# Altium integrated library Altium_USB.IntLib: 46 symbols (part 1 of 2)
Pins are listed as number, name and electrical type; pins without a type are passive.

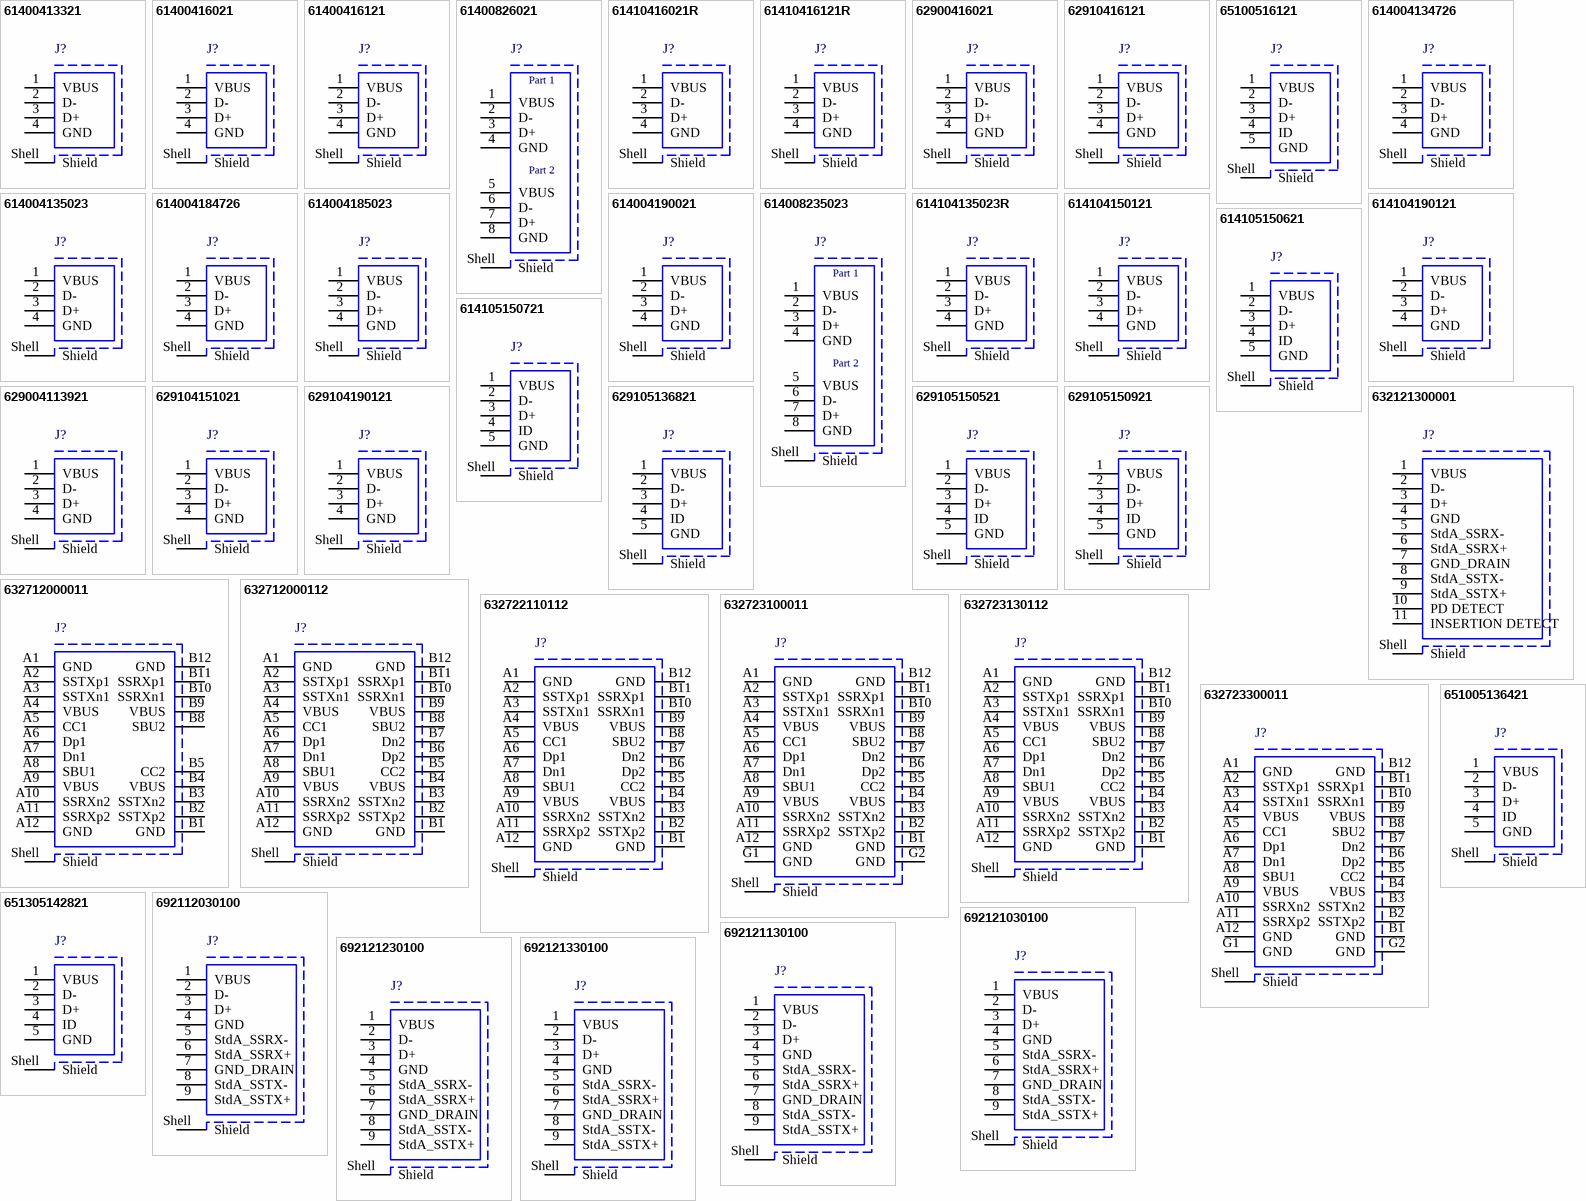
[diagram p0: symbols 61400413321 to 692121330100]

## 61400413321
designator J?
USB 2.0 Type B Receptacle WR-COM, Vertical, THT; Part Number: 61400413321; Rated Current: 1.5 A; Contact Resistance: 20 mOhm; Working Voltage: 30 VAC; Supply Name 1: Mouser; Supply SN 1: 710-61400413321; Supply Name 2: thegioiic; ComponentLink1Description: Manufacturer; ComponentLink1URL: http://www.we-online.de; ComponentLink2Description: Datasheet; ComponentLink2URL: https://katalog.we-online.de/em/datasheet/61400413321.pdf; Published Date: September 2018; Publisher: Wurth Elektronik; Orientation: Vertical; Connector Type: USB 2.0 Type B; Operating Temperature: -40 to 105 degC; Mounting Technology: THT; Gender: Receptacle; Packaging: Tray; ComponentLink3Description: Global Supply; ComponentLink3URL: https://www.we-online.com/en/components/products/COM_TYPE_B_VERTICAL?sq=61400413321#61400413321; ComponentLink4Description: Global Supply; ComponentLink4URL: https://www.mouser.vn/ProductDetail/Wurth-Elektronik/61400413321?qs=rS3zZhy2AQPX0EcryzeSDw%3D%3D; ComponentLink5Description: Local Supply; ComponentLink5URL: https://www.thegioiic.com/bf180-cong-usb-cai-2-0-type-b-4-chan-thang-xuyen-lo; Supply URL 1: https://www.mouser.vn/ProductDetail/Wurth-Elektronik/61400413321?qs=rS3zZhy2AQPX0EcryzeSDw%3D%3D; Supply URL 2: https://www.thegioiic.com/bf180-cong-usb-cai-2-0-type-b-4-chan-thang-xuyen-lo
footprint 61400413321
pins: 1 VBUS, 2 D-, 3 D+, 4 GND, Shell Shield

## 61400416021
designator J?
USB 2.0 Type A Receptacle WR-COM, Horizontal, THT; Part Number: 61400416021; Rated Current: 1.5 A; Contact Resistance: 20 mOhm; Working Voltage: 30 VAC; Supply Name 1: Mouser; Supply SN 1: 710-61400416021; ComponentLink1Description: Manufacturer; ComponentLink1URL: http://www.we-online.de; ComponentLink2Description: Datasheet; ComponentLink2URL: https://katalog.we-online.de/em/datasheet/61400416021.pdf; Published Date: September 2018; Publisher: Wurth Elektronik; Orientation: Horizontal; Connector Type: USB 2.0 Type A; Operating Temperature: -40 to 105 degC; Mounting Technology: THT; Gender: Receptacle; Packaging: Tray; ComponentLink3Description: Global Supply; ComponentLink3URL: https://www.we-online.com/en/components/products/COM_TYPE_A_HORIZONTAL?sq=61400416021#61400416021; ComponentLink4Description: Global Supply; ComponentLink4URL: https://www.mouser.vn/c/?q=61400416021; Supply URL 1: https://www.mouser.vn/ProductDetail/Wurth-Elektronik/61400416021?qs=rS3zZhy2AQM1ZldAqz%2FFOw%3D%3D
footprint 61400416021
pins: 1 VBUS, 2 D-, 3 D+, 4 GND, Shell Shield

## 61400416121
designator J?
USB 2.0 Type B Receptacle WR-COM, Horizontal, THT, with Pads and Pegs; Part Number: 61400416121; Rated Current: 1.5 A; Contact Resistance: 20 mOhm; Working Voltage: 30 VAC; Supply Name 1: Mouser; Supply SN 1: 710-61400416121; ComponentLink1Description: Manufacturer; ComponentLink1URL: http://www.we-online.de; ComponentLink2Description: Datasheet; ComponentLink2URL: https://katalog.we-online.de/em/datasheet/61400416121.pdf; Published Date: September 2018; Publisher: Wurth Elektronik; Orientation: Horizontal; Connector Type: USB 2.0 Type B; Operating Temperature: -40 to 105 degC; Mounting Technology: THT; Gender: Receptacle; Packaging: Tray; ComponentLink3Description: Global Supply; ComponentLink3URL: https://www.we-online.com/en/components/products/COM_TYPE_B_HORIZONTAL?sq=61400416121#61400416121; ComponentLink4Description: Global Supply; ComponentLink4URL: https://www.mouser.vn/ProductDetail/Wurth-Elektronik/61400416121?qs=rS3zZhy2AQOfJvFesH7XZA%3D%3D; Supply URL 1: https://www.mouser.vn/ProductDetail/Wurth-Elektronik/61400416121?qs=rS3zZhy2AQOfJvFesH7XZA%3D%3D
footprint 61400416121
pins: 1 VBUS, 2 D-, 3 D+, 4 GND, Shell Shield

## 61400826021
designator J?
USB 2.0 Type A Receptacle WR-COM, Stacked Horizontal, THT; Part Number: 61400826021; Rated Current: 1.5 A; Contact Resistance: 20 mOhm; Working Voltage: 30 VAC; Supply Name 1: Mouser; Supply SN 1: 710-61400826021; Supply Name 2: thegioiic; ComponentLink1Description: Manufacturer; ComponentLink1URL: http://www.we-online.de; ComponentLink2Description: Datasheet; ComponentLink2URL: https://katalog.we-online.de/em/datasheet/61400826021.pdf; Published Date: September 2018; Publisher: Wurth Elektronik; Orientation: Stacked Horizontal; Connector Type: USB 2.0 Type A; Operating Temperature: -40 to 105 degC; Mounting Technology: THT; Gender: Receptacle; Packaging: Tray; ComponentLink3Description: Global Supply; ComponentLink3URL: https://www.we-online.com/en/components/products/COM_TYPE_A_HORIZONTAL_DUAL_STACKED?sq=61400826021#61400826021; ComponentLink4Description: Global Supply; ComponentLink4URL: https://www.mouser.vn/ProductDetail/Wurth-Elektronik/61400826021?qs=rS3zZhy2AQNRjP3Vs%2FPxTg%3D%3D; ComponentLink5Description: Local Supply; ComponentLink5URL: https://www.thegioiic.com/cong-usb-cai-doi-2-0-type-a-8-chan-cong-90-do-v2; Supply URL 1: https://www.mouser.vn/ProductDetail/Wurth-Elektronik/61400826021?qs=rS3zZhy2AQNRjP3Vs%2FPxTg%3D%3D; Supply URL 2: https://www.thegioiic.com/cong-usb-cai-doi-2-0-type-a-8-chan-cong-90-do-v2
footprint 61400826021
pins: 1 VBUS, 2 D-, 3 D+, 4 GND, 5 VBUS, 6 D-, 7 D+, 8 GND, Shell Shield
text: Part 1; Part 2

## 61410416021R
designator J?
USB 2.0 Type A Receptacle WR-COM, Horizontal, SMT; Part Number: 61410416021R; Rated Current: 1.5 A; Contact Resistance: 30 mOhm; Working Voltage: 30 VAC; ComponentLink1Description: Manufacturer; ComponentLink1URL: http://www.we-online.de; ComponentLink2Description: Datasheet; ComponentLink2URL: https://katalog.we-online.de/em/datasheet/61410416021R.pdf; Published Date: September 2018; Publisher: Wurth Elektronik; Orientation: Horizontal; Connector Type: USB 2.0 Type A; Operating Temperature: -55 to 85 degC; Mounting Technology: SMT; Gender: Receptacle; Packaging: Tape and Reel; ComponentLink3Description: Global Supply; ComponentLink3URL: https://www.we-online.com/en/components/products/COM_THR_TYPE_A_HORIZONTAL?sq=61410416021R#61410416021R
footprint 61410416021R
pins: 1 VBUS, 2 D-, 3 D+, 4 GND, Shell Shield

## 61410416121R
designator J?
USB 2.0 Type B Receptacle WR-COM, Horizontal, SMT; Part Number: 61410416121R; Rated Current: 1.5 A; Contact Resistance: 30 mOhm; Working Voltage: 30 VAC; Supply Name 2: thegioiic; ComponentLink1Description: Manufacturer; ComponentLink1URL: http://www.we-online.de; ComponentLink2Description: Datasheet; ComponentLink2URL: https://katalog.we-online.de/em/datasheet/61410416121R.pdf; Published Date: September 2018; Publisher: Wurth Elektronik; Orientation: Horizontal; Connector Type: USB 2.0 Type B; Operating Temperature: -55 to 85 degC; Mounting Technology: SMT; Gender: Receptacle; Packaging: Tape and Reel; ComponentLink3Description: Global Supply; ComponentLink3URL: https://www.we-online.com/en/components/products/COM_THR_TYPE_B_HORIZONTAL?sq=61410416121R#61410416121R; ComponentLink4Description: Local Supply; ComponentLink4URL: https://www.thegioiic.com/bf90-cong-usb-cai-2-0-type-b-4-chan-cong-90-do-xuyen-lo; Supply URL 2: https://www.thegioiic.com/bf90-cong-usb-cai-2-0-type-b-4-chan-cong-90-do-xuyen-lo
footprint 61410416121R
pins: 1 VBUS, 2 D-, 3 D+, 4 GND, Shell Shield

## 62900416021
designator J?
USB 2.0 Type A Receptacle WR-COM, Horizontal, SMT; Part Number: 62900416021; Rated Current: 1.5 A; Contact Resistance: 20 mOhm; Working Voltage: 30 VAC; Supply Name 1: Mouser; Supply SN 1: 710-62900416021; ComponentLink1Description: Manufacturer; ComponentLink1URL: http://www.we-online.de; ComponentLink2Description: Datasheet; ComponentLink2URL: https://katalog.we-online.de/em/datasheet/62900416021.pdf; Published Date: September 2018; Publisher: Wurth Elektronik; Orientation: Horizontal; Connector Type: USB 2.0 Type A; Operating Temperature: -40 to 105 degC; Mounting Technology: SMT; Gender: Receptacle; Packaging: Tray; ComponentLink3Description: Global Supply; ComponentLink3URL: https://www.we-online.com/en/components/products/COM_SMT_TYPE_A_HORIZONTAL?sq=62900416021#62900416021; ComponentLink4Description: Global Supply; ComponentLink4URL: https://www.mouser.vn/ProductDetail/Wurth-Elektronik/62900416021?qs=7gQLVZk5cPluNNYrEeR0bw%3D%3D; Supply URL 1: https://www.mouser.vn/ProductDetail/Wurth-Elektronik/62900416021?qs=7gQLVZk5cPluNNYrEeR0bw%3D%3D
footprint 62900416021
pins: 1 VBUS, 2 D-, 3 D+, 4 GND, Shell Shield

## 62910416121
designator J?
USB 2.0 Type B Receptacle WR-COM, Horizontal, SMT, with Pads and Pegs; Part Number: 62910416121; Rated Current: 1.5 A; Contact Resistance: 20 mOhm; Working Voltage: 30 VAC; Supply Name 1: Mouser; Supply SN 1: 710-62910416121; Supply Name 2: thegioiic; ComponentLink1Description: Manufacturer; ComponentLink1URL: http://www.we-online.de; ComponentLink2Description: Datasheet; ComponentLink2URL: https://katalog.we-online.de/em/datasheet/62910416121.pdf; Published Date: September 2018; Publisher: Wurth Elektronik; Orientation: Horizontal; Connector Type: USB 2.0 Type B; Operating Temperature: -40 to 105 degC; Mounting Technology: SMT; Gender: Receptacle; Packaging: Tape and Reel; ComponentLink3Description: Global Supply; ComponentLink3URL: https://www.we-online.com/en/components/products/COM_SMT_TYPE_B_HORIZONTAL?sq=62910416121#62910416121; ComponentLink4Description: Global Supply; ComponentLink4URL: https://www.mouser.vn/ProductDetail/Wurth-Elektronik/62910416121?qs=7gQLVZk5cPl%252BMjVYEg%252B8ng%3D%3D; ComponentLink5Description: Local Supply; ComponentLink5URL: https://www.thegioiic.com/bf90-cong-usb-cai-2-0-type-b-4-chan-thang-dan-smd; Supply URL 1: https://www.mouser.vn/ProductDetail/Wurth-Elektronik/62910416121?qs=7gQLVZk5cPl%252BMjVYEg%252B8ng%3D%3D; Supply URL 2: https://www.thegioiic.com/bf90-cong-usb-cai-2-0-type-b-4-chan-thang-dan-smd
footprint 62910416121
pins: 1 VBUS, 2 D-, 3 D+, 4 GND, Shell Shield

## 65100516121
designator J?
Mini USB 2.0 Type B Receptacle WR-COM, Horizontal, SMT, with Pads and Pegs; Part Number: 65100516121; Rated Current: 1 A; Contact Resistance: 20 mOhm; Working Voltage: 30 VAC; Supply Name 1: Mouser; Supply SN 1: 710-65100516121; ComponentLink1Description: Manufacturer; ComponentLink1URL: http://www.we-online.de; ComponentLink2Description: Datasheet; ComponentLink2URL: https://katalog.we-online.de/em/datasheet/65100516121.pdf; Published Date: September 2018; Publisher: Wurth Elektronik; Orientation: Horizontal; Connector Type: Mini USB 2.0 Type B; Operating Temperature: -40 to 105 degC; Mounting Technology: SMT; Gender: Receptacle; Packaging: Tape and Reel; ComponentLink3Description: Global Supply; ComponentLink3URL: https://www.we-online.com/en/components/products/COM_SMT_MINI_TYPE_B_HORIZONTAL?sq=65100516121#65100516121; ComponentLink4Description: Global Supply; ComponentLink4URL: https://www.mouser.vn/ProductDetail/Wurth-Elektronik/65100516121?qs=rS3zZhy2AQPLyCguT204Og%3D%3D; Supply URL 1: https://www.mouser.vn/ProductDetail/Wurth-Elektronik/65100516121?qs=rS3zZhy2AQPLyCguT204Og%3D%3D
footprint 65100516121
pins: 1 VBUS, 2 D-, 3 D+, 4 ID, 5 GND, Shell Shield

## 614004134726
designator J?
USB 2.0 Type A Receptacle WR-COM, Up Right, THT; Part Number: 614004134726; Rated Current: 1.5 A; Contact Resistance: 20 mOhm; Working Voltage: 30 VAC; Supply Name 1: Mouser; Supply SN 1: 710-614004134726; Supply Name 2: thegioiic; ComponentLink1Description: Manufacturer; ComponentLink1URL: http://www.we-online.de; ComponentLink2Description: Datasheet; ComponentLink2URL: https://katalog.we-online.de/em/datasheet/614004134726.pdf; Published Date: September 2018; Publisher: Wurth Elektronik; Orientation: Up Right; Connector Type: USB 2.0 Type A; Operating Temperature: -40 to 105 degC; Mounting Technology: THT; Gender: Receptacle; Packaging: Tray; ComponentLink3Description: Global Supply; ComponentLink3URL: https://www.we-online.com/en/components/products/COM_TYPE_A_UP_RIGHT?sq=614004134726#614004134726; ComponentLink4Description: Global Supply; ComponentLink4URL: https://www.mouser.vn/c/?q=614004134726; ComponentLink5Description: Local Supply; ComponentLink5URL: https://www.thegioiic.com/cong-usb-cai-2-0-type-a-4-chan-cong-90-do; Supply URL 1: https://www.mouser.vn/ProductDetail/Wurth-Elektronik/614004134726?qs=rS3zZhy2AQNbVw9UXcmAhg%3D%3D; Supply URL 2: https://www.thegioiic.com/cong-usb-cai-2-0-type-a-4-chan-cong-90-do
footprint 614004134726
pins: 1 VBUS, 2 D-, 3 D+, 4 GND, Shell Shield

## 614004135023
designator J?
USB 2.0 Type A Receptacle WR-COM, Vertical, THT; Part Number: 614004135023; Rated Current: 1.5 A; Contact Resistance: 20 mOhm; Working Voltage: 30 VAC; Supply Name 1: Mouser; Supply SN 1: 710-614004135023; Supply Name 2: thegioiic; ComponentLink1Description: Manufacturer; ComponentLink1URL: http://www.we-online.de; ComponentLink2Description: Datasheet; ComponentLink2URL: https://katalog.we-online.de/em/datasheet/614004135023.pdf; Published Date: September 2018; Publisher: Wurth Elektronik; Orientation: Vertical; Connector Type: USB 2.0 Type A; Operating Temperature: -40 to 105 degC; Mounting Technology: THT; Gender: Receptacle; Packaging: Tray; ComponentLink3Description: Global Supply; ComponentLink3URL: https://www.we-online.com/en/components/products/COM_TYPE_A_VERTICAL?sq=614004135023#614004135023; ComponentLink4Description: Global Supply; ComponentLink4URL: https://www.mouser.vn/c/?q=614004135023; ComponentLink5Description: Local Supply; ComponentLink5URL: https://www.thegioiic.com/af180-cong-usb-cai-2-0-type-a-4-chan-thang-xuyen-lo; Supply URL 1: https://www.mouser.vn/ProductDetail/Wurth-Elektronik/614004135023?qs=rS3zZhy2AQOqyRkjM2kpsA%3D%3D; Supply URL 2: https://www.thegioiic.com/af180-cong-usb-cai-2-0-type-a-4-chan-thang-xuyen-lo
footprint 614004135023
pins: 1 VBUS, 2 D-, 3 D+, 4 GND, Shell Shield

## 614004184726
designator J?
USB 2.0 Type A Receptacle WR-COM, Up Right, THT, Short Type; Part Number: 614004184726; Rated Current: 2 A; Contact Resistance: 30 mOhm; Working Voltage: 30 VAC; Supply Name 1: Mouser; Supply SN 1: 710-614004184726; ComponentLink1Description: Manufacturer; ComponentLink1URL: http://www.we-online.de; ComponentLink2Description: Datasheet; ComponentLink2URL: https://katalog.we-online.de/em/datasheet/614004184726.pdf; Published Date: September 2018; Publisher: Wurth Elektronik; Orientation: Up Right; Connector Type: USB 2.0 Type A; Operating Temperature: -40 to 85 degC; Mounting Technology: THT; Gender: Receptacle; Packaging: Tray; ComponentLink3Description: Global Supply; ComponentLink3URL: https://www.we-online.com/en/components/products/COM_THT_TYPE_A_UP_RIGHT?sq=614004184726#614004184726; ComponentLink4Description: Global Supply; ComponentLink4URL: https://www.mouser.vn/ProductDetail/Wurth-Elektronik/614004184726?qs=DvsTirrhYfNgYyvzU3HeBQ%3D%3D; Supply URL 1: https://www.mouser.vn/ProductDetail/Wurth-Elektronik/614004184726?qs=DvsTirrhYfNgYyvzU3HeBQ%3D%3D
footprint 614004184726
pins: 1 VBUS, 2 D-, 3 D+, 4 GND, Shell Shield

## 614004185023
designator J?
USB 2.0 Type A Receptacle WR-COM, Vertical, THT, Short Type; Part Number: 614004185023; Rated Current: 1.5 A; Contact Resistance: 30 mOhm; Working Voltage: 30 VAC; Supply Name 1: Mouser; Supply SN 1: 710-614004185023; ComponentLink1Description: Manufacturer; ComponentLink1URL: http://www.we-online.de; ComponentLink2Description: Datasheet; ComponentLink2URL: https://katalog.we-online.de/em/datasheet/614004185023.pdf; Published Date: September 2018; Publisher: Wurth Elektronik; Orientation: Vertical; Connector Type: USB 2.0 Type A; Operating Temperature: -55 to 85 degC; Mounting Technology: THT; Gender: Receptacle; Packaging: Tray; ComponentLink3Description: Global Supply; ComponentLink3URL: https://www.we-online.com/en/components/products/COM_THT_TYPE_A_VERTICAL_SHORT_TYPE?sq=614004185023#614004185023; ComponentLink4Description: Global Supply; ComponentLink4URL: https://www.mouser.vn/ProductDetail/Wurth-Elektronik/614004185023?qs=DvsTirrhYfM3pfoSf%2FDhmA%3D%3D; Supply URL 1: https://www.mouser.vn/ProductDetail/Wurth-Elektronik/614004185023?qs=DvsTirrhYfM3pfoSf%2FDhmA%3D%3D
footprint 614004185023
pins: 1 VBUS, 2 D-, 3 D+, 4 GND, Shell Shield

## 614004190021
designator J?
USB 2.0 Type A Receptacle WR-COM, Horizontal, THT, with High Current at Pin 1 & 4; Part Number: 614004190021; Rated Current: 3 A; Contact Resistance: 30 mOhm; Working Voltage: 30 VAC; Supply Name 1: Mouser; Supply SN 1: 710-614004190021; ComponentLink1Description: Manufacturer; ComponentLink1URL: http://www.we-online.de; ComponentLink2Description: Datasheet; ComponentLink2URL: https://katalog.we-online.de/em/datasheet/614004190021.pdf; Published Date: September 2018; Publisher: Wurth Elektronik; Orientation: Horizontal; Connector Type: USB 2.0 Type A; Operating Temperature: -40 to 85 degC; Mounting Technology: THT; Gender: Receptacle; Packaging: Tray; ComponentLink3Description: Global Supply; ComponentLink3URL: https://www.we-online.com/en/components/products/COM_2_0_THT_TYPE_A_HORIZONTAL?sq=614004190021#614004190021; ComponentLink4Description: Global Supply; ComponentLink4URL: https://www.mouser.vn/ProductDetail/Wurth-Elektronik/614004190021?qs=DvsTirrhYfPiiHUeEQNGBQ%3D%3D; Supply URL 1: https://www.mouser.vn/ProductDetail/Wurth-Elektronik/614004190021?qs=DvsTirrhYfPiiHUeEQNGBQ%3D%3D
footprint 614004190021
pins: 1 VBUS, 2 D-, 3 D+, 4 GND, Shell Shield

## 614008235023
designator J?
USB 2.0 Type A Receptacle WR-COM, Stacked Vertical, THT; Part Number: 614008235023; Rated Current: 1.5 A; Contact Resistance: 20 mOhm; Working Voltage: 30 VAC; Supply Name 1: Mouser; Supply SN 1: 710-614008235023; ComponentLink1Description: Manufacturer; ComponentLink1URL: http://www.we-online.de; ComponentLink2Description: Datasheet; ComponentLink2URL: https://katalog.we-online.de/em/datasheet/614008235023.pdf; Published Date: September 2018; Publisher: Wurth Elektronik; Orientation: Stacked Vertical; Connector Type: USB 2.0 Type A; Operating Temperature: -40 to 105 degC; Mounting Technology: THT; Gender: Receptacle; Packaging: Tray; ComponentLink3Description: Global Supply; ComponentLink3URL: https://www.we-online.com/en/components/products/COM_TYPE_A_VERTICAL_DUAL?sq=614008235023#614008235023; ComponentLink4Description: Global Supply; ComponentLink4URL: https://www.mouser.vn/ProductDetail/Wurth-Elektronik/614008235023?qs=rS3zZhy2AQP6TSxAYKTnAw%3D%3D; Supply URL 1: https://www.mouser.vn/ProductDetail/Wurth-Elektronik/614008235023?qs=rS3zZhy2AQP6TSxAYKTnAw%3D%3D
footprint 614008235023
pins: 1 VBUS, 2 D-, 3 D+, 4 GND, 5 VBUS, 6 D-, 7 D+, 8 GND, Shell Shield
text: Part 1; Part 2

## 614104135023R
designator J?
USB 2.0 Type A Receptacle WR-COM, Vertical, SMT; Part Number: 614104135023R; Rated Current: 1.5 A; Contact Resistance: 30 mOhm; Working Voltage: 30 VAC; ComponentLink1Description: Manufacturer; ComponentLink1URL: http://www.we-online.de; ComponentLink2Description: Datasheet; ComponentLink2URL: https://katalog.we-online.de/em/datasheet/614104135023R.pdf; Published Date: September 2018; Publisher: Wurth Elektronik; Orientation: Vertical; Connector Type: USB 2.0 Type A; Operating Temperature: -55 to 85 degC; Mounting Technology: SMT; Gender: Receptacle; Packaging: Tape and Reel; ComponentLink3Description: Global Supply; ComponentLink3URL: https://www.we-online.com/en/components/products/COM_THR_TYPE_A_VERTICAL?sq=614104135023R#614104135023R
footprint 614104135023R
pins: 1 VBUS, 2 D-, 3 D+, 4 GND, Shell Shield

## 614104150121
designator J?
USB 2.0 Type A Receptacle WR-COM, Horizontal, THT, with Clips; Part Number: 614104150121; Rated Current: 1.5 A; Contact Resistance: 30 mOhm; Working Voltage: 30 VAC; Supply Name 1: Mouser; Supply SN 1: 710-614104150121; ComponentLink1Description: Manufacturer; ComponentLink1URL: http://www.we-online.de; ComponentLink2Description: Datasheet; ComponentLink2URL: https://katalog.we-online.de/em/datasheet/614104150121%282%29.pdf; Published Date: September 2018; Publisher: Wurth Elektronik; Orientation: Horizontal; Connector Type: USB 2.0 Type A; Operating Temperature: -40 to 85 degC; Mounting Technology: THT; Gender: Receptacle; Packaging: Tape and Reel; ComponentLink3Description: Global Supply; ComponentLink3URL: https://www.we-online.com/en/components/products/COM_2_0_THT_TYPE_A_HORIZONTAL_SHORT_TYPE?sq=614104150121#614104150121; ComponentLink4Description: Global Supply; ComponentLink4URL: https://www.mouser.vn/ProductDetail/Wurth-Elektronik/614104150121?qs=a9WhcLg8qCz3wt21uTqGxw%3D%3D; Supply URL 1: https://www.mouser.vn/ProductDetail/Wurth-Elektronik/614104150121?qs=a9WhcLg8qCz3wt21uTqGxw%3D%3D
footprint 614104150121
pins: 1 VBUS, 2 D-, 3 D+, 4 GND, Shell Shield

## 614104190121
designator J?
USB 2.0 Type A Receptacle WR-COM, Horizontal, THT, Short Type with Clips; Part Number: 614104190121; Rated Current: 1.5 A; Contact Resistance: 30 mOhm; Working Voltage: 30 VAC; Supply Name 1: Mouser; Supply SN 1: 710-614104190121; ComponentLink1Description: Manufacturer; ComponentLink1URL: http://www.we-online.de; ComponentLink2Description: Datasheet; ComponentLink2URL: https://katalog.we-online.de/em/datasheet/614104190121.pdf; Published Date: September 2018; Publisher: Wurth Elektronik; Orientation: Horizontal; Connector Type: USB 2.0 Type A; Operating Temperature: -55 to 85 degC; Mounting Technology: THT; Gender: Receptacle; Packaging: Tape and Reel; ComponentLink3Description: Global Supply; ComponentLink3URL: https://www.we-online.com/en/components/products/COM_THT_TYPE_A_HORIZONTAL?sq=614104190121#614104190121; ComponentLink4Description: Global Supply; ComponentLink4URL: https://www.mouser.vn/ProductDetail/Wurth-Elektronik/614104190121?qs=DvsTirrhYfMPx7JlubFZPg%3D%3D; Supply URL 1: https://www.mouser.vn/ProductDetail/Wurth-Elektronik/614104190121?qs=DvsTirrhYfMPx7JlubFZPg%3D%3D
footprint 614104190121
pins: 1 VBUS, 2 D-, 3 D+, 4 GND, Shell Shield

## 614105150621
designator J?
Micro USB 2.0 Type AB Receptacle WR-COM, Vertical, THT; Part Number: 614105150621; Rated Current: 1.8 A; Contact Resistance: 30 mOhm; Working Voltage: 30 VAC; Supply Name 1: Mouser; Supply SN 1: 710-614105150621; ComponentLink1Description: Manufacturer; ComponentLink1URL: http://www.we-online.de; ComponentLink2Description: Datasheet; ComponentLink2URL: https://katalog.we-online.de/em/datasheet/614105150621.pdf; Published Date: September 2018; Publisher: Wurth Elektronik; Orientation: Vertical; Connector Type: Micro USB 2.0 Type AB; Operating Temperature: -40 to 85 degC; Mounting Technology: THT; Gender: Receptacle; Packaging: Tape and Reel; ComponentLink3Description: Global Supply; ComponentLink3URL: https://www.we-online.com/en/components/products/COM_MICRO_TYPE_AB_VERTICAL?sq=614105150621#614105150621; ComponentLink4Description: Global Supply; ComponentLink4URL: https://www.mouser.vn/ProductDetail/Wurth-Elektronik/614105150621?qs=a9WhcLg8qCwYtG%252B1m8lwPw%3D%3D; Supply URL 1: https://www.mouser.vn/ProductDetail/Wurth-Elektronik/614105150621?qs=a9WhcLg8qCwYtG%252B1m8lwPw%3D%3D
footprint 614105150621
pins: 1 VBUS, 2 D-, 3 D+, 4 ID, 5 GND, Shell Shield

## 614105150721
designator J?
Micro USB 2.0 Type B Receptacle WR-COM, Vertical, THT; Part Number: 614105150721; Rated Current: 1.8 A; Contact Resistance: 30 mOhm; Working Voltage: 30 VAC; Supply Name 1: Mouser; Supply SN 1: 710-614105150721; ComponentLink1Description: Manufacturer; ComponentLink1URL: http://www.we-online.de; ComponentLink2Description: Datasheet; ComponentLink2URL: https://katalog.we-online.de/em/datasheet/614105150721.pdf; Published Date: September 2018; Publisher: Wurth Elektronik; Orientation: Vertical; Connector Type: Micro USB 2.0 Type B; Operating Temperature: -40 to 85 degC; Mounting Technology: THT; Gender: Receptacle; Packaging: Tape and Reel; ComponentLink3Description: Global Supply; ComponentLink3URL: https://www.we-online.com/en/components/products/COM_MICRO_TYPE_B_VERTICAL?sq=614105150721#614105150721; ComponentLink4Description: Global Supply; ComponentLink4URL: https://www.mouser.vn/ProductDetail/Wurth-Elektronik/614105150721?qs=a9WhcLg8qCw5r6rjD3973Q%3D%3D; Supply URL 1: https://www.mouser.vn/ProductDetail/Wurth-Elektronik/614105150721?qs=a9WhcLg8qCw5r6rjD3973Q%3D%3D
footprint 614105150721
pins: 1 VBUS, 2 D-, 3 D+, 4 ID, 5 GND, Shell Shield

## 629004113921
designator J?
USB 2.0 Type A Plug WR-COM, Horizontal, SMT, with Clips; Part Number: 629004113921; Rated Current: 1.5 A; Contact Resistance: 20 mOhm; Working Voltage: 30 VAC; Supply Name 1: Mouser; Supply SN 1: 710-629004113921; Supply Name 2: thegioiic; ComponentLink1Description: Manufacturer; ComponentLink1URL: http://www.we-online.de; ComponentLink2Description: Datasheet; ComponentLink2URL: https://katalog.we-online.de/em/datasheet/629004113921.pdf; Published Date: September 2018; Publisher: Wurth Elektronik; Orientation: Horizontal; Connector Type: USB 2.0 Type A; Operating Temperature: -40 to 105 degC; Mounting Technology: SMT; Gender: Plug; Packaging: Tube; ComponentLink3Description: Global Supply; ComponentLink3URL: https://www.we-online.com/en/components/products/COM_PLUG_SMT_TYPE_A_W_CLIP?sq=629004113921#629004113921; ComponentLink4Description: Global Supply; ComponentLink4URL: https://www.mouser.vn/ProductDetail/Wurth-Elektronik/629004113921?qs=35zkduByVmhHRkVkRjAlEQ%3D%3D; ComponentLink5Description: Local Supply; ComponentLink5URL: https://www.thegioiic.com/cong-usb-duc-2-0-type-a-4-chan-thang-han-day-vo-den; Supply URL 1: https://www.mouser.vn/ProductDetail/Wurth-Elektronik/629004113921?qs=35zkduByVmhHRkVkRjAlEQ%3D%3D; Supply URL 2: https://www.thegioiic.com/cong-usb-duc-2-0-type-a-4-chan-thang-han-day-vo-den
footprint 629004113921
pins: 1 VBUS, 2 D-, 3 D+, 4 GND, Shell Shield

## 629104151021
designator J?
USB 2.0 Type A Receptacle WR-COM, Horizontal, SMT, with Pegs; Part Number: 629104151021; Rated Current: 1.5 A; Contact Resistance: 30 mOhm; Working Voltage: 30 VAC; Supply Name 1: Mouser; Supply SN 1: 710-629104151021; ComponentLink1Description: Manufacturer; ComponentLink1URL: http://www.we-online.de; ComponentLink2Description: Datasheet; ComponentLink2URL: https://katalog.we-online.de/em/datasheet/629104151021.pdf; Published Date: September 2018; Publisher: Wurth Elektronik; Orientation: Horizontal; Connector Type: USB 2.0 Type A; Operating Temperature: -40 to 85 degC; Mounting Technology: SMT; Gender: Receptacle; Packaging: Tape and Reel; ComponentLink3Description: Global Supply; ComponentLink3URL: https://www.we-online.com/en/components/products/COM_2_0_SMT_TYPE_A_HORIZONTAL?sq=629104151021#629104151021; ComponentLink4Description: Global Supply; ComponentLink4URL: https://www.mouser.vn/c/?q=629104151021; Supply URL 1: https://www.mouser.vn/ProductDetail/Wurth-Elektronik/629104151021?qs=sGAEpiMZZMvlX3nhDDO4APt9wDfpfys0wILcvsJYjRU%3D
footprint 629104151021
pins: 1 VBUS, 2 D-, 3 D+, 4 GND, Shell Shield

## 629104190121
designator J?
USB 2.0 Type A Receptacle WR-COM, Horizontal, SMT, Short Type with Pads and Pegs; Part Number: 629104190121; Rated Current: 1.5 A; Contact Resistance: 30 mOhm; Working Voltage: 30 VAC; Supply Name 1: Mouser; Supply SN 1: 710-629104190121; ComponentLink1Description: Manufacturer; ComponentLink1URL: http://www.we-online.de; ComponentLink2Description: Datasheet; ComponentLink2URL: https://katalog.we-online.de/em/datasheet/629104190121.pdf; Published Date: September 2018; Publisher: Wurth Elektronik; Orientation: Horizontal; Connector Type: USB 2.0 Type A; Operating Temperature: -40 to 85 degC; Mounting Technology: SMT; Gender: Receptacle; Packaging: Tape and Reel; ComponentLink3Description: Global Supply; ComponentLink3URL: https://www.we-online.com/en/components/products/COM_2_0_SMT_TYPE_A_HORIZONTAL_SHORT_TYPE?sq=629104190121#629104190121; ComponentLink4Description: Global Supply; ComponentLink4URL: https://www.mouser.vn/ProductDetail/Wurth-Elektronik/629104190121?qs=lBTPRtX1sU8FkkdswgHZbg%3D%3D; Supply URL 1: https://www.mouser.vn/ProductDetail/Wurth-Elektronik/629104190121?qs=lBTPRtX1sU8FkkdswgHZbg%3D%3D
footprint 629104190121
pins: 1 VBUS, 2 D-, 3 D+, 4 GND, Shell Shield

## 629105136821
designator J?
Micro USB 2.0 Type B Receptacle WR-COM, Horizontal, SMT, with Pads and Pegs; Part Number: 629105136821; Rated Current: 1 A; Contact Resistance: 30 mOhm; Working Voltage: 30 VAC; Supply Name 1: Mouser; Supply SN 1: 710-629105136821; ComponentLink1Description: Manufacturer; ComponentLink1URL: http://www.we-online.de; ComponentLink2Description: Datasheet; ComponentLink2URL: https://katalog.we-online.de/em/datasheet/629105136821.pdf; Published Date: September 2018; Publisher: Wurth Elektronik; Orientation: Horizontal; Connector Type: Micro USB 2.0 Type B; Operating Temperature: -40 to 105 degC; Mounting Technology: SMT; Gender: Receptacle; Packaging: Tape and Reel; ComponentLink3Description: Global Supply; ComponentLink3URL: https://www.we-online.com/en/components/products/COM_MICRO_SMT_TYPE_B_HORIZONTAL?sq=629105136821#629105136821; ComponentLink4Description: Global Supply; ComponentLink4URL: https://www.mouser.vn/ProductDetail/Wurth-Elektronik/629105136821?qs=P%2FTEqz%252BQfncvaTjfhhJgDA%3D%3D; Supply URL 1: https://www.mouser.vn/ProductDetail/Wurth-Elektronik/629105136821?qs=P%2FTEqz%252BQfncvaTjfhhJgDA%3D%3D
footprint 629105136821
pins: 1 VBUS, 2 D-, 3 D+, 4 ID, 5 GND, Shell Shield

## 629105150521
designator J?
Micro USB 2.0 Type B Receptacle WR-COM, Horizontal, SMT, with Pegs, High Current at Pin 1 & Pin 5; Part Number: 629105150521; Rated Current: 3 A; Contact Resistance: 30 mOhm; Working Voltage: 30 VAC; Supply Name 1: Mouser; Supply SN 1: 710-629105150521; ComponentLink1Description: Manufacturer; ComponentLink1URL: http://www.we-online.de; ComponentLink2Description: Datasheet; ComponentLink2URL: https://katalog.we-online.de/em/datasheet/629105150521.pdf; Published Date: September 2018; Publisher: Wurth Elektronik; Orientation: Horizontal; Connector Type: Micro USB 2.0 Type B; Operating Temperature: -40 to 85 degC; Mounting Technology: SMT; Gender: Receptacle; Packaging: Tape and Reel; ComponentLink3Description: Global Supply; ComponentLink3URL: https://www.we-online.com/en/components/products/COM_MICRO_SMT_TYPE_B_HORIZONTAL_HIGH_CURRENT?sq=629105150521#629105150521; ComponentLink4Description: Global Supply; ComponentLink4URL: https://www.mouser.vn/ProductDetail/Wurth-Elektronik/629105150521?qs=a9WhcLg8qCzXiH7kZP8GRQ%3D%3D; Supply URL 1: https://www.mouser.vn/ProductDetail/Wurth-Elektronik/629105150521?qs=a9WhcLg8qCzXiH7kZP8GRQ%3D%3D
footprint 629105150521
pins: 1 VBUS, 2 D-, 3 D+, 4 ID, 5 GND, Shell Shield

## 629105150921
designator J?
Micro USB 2.0 Type AB Receptacle WR-COM, Horizontal, SMT; Part Number: 629105150921; Rated Current: 1.8 A; Contact Resistance: 30 mOhm; Working Voltage: 30 VAC; Supply Name 1: Mouser; Supply SN 1: 710-629105150921; ComponentLink1Description: Manufacturer; ComponentLink1URL: http://www.we-online.de; ComponentLink2Description: Datasheet; ComponentLink2URL: https://katalog.we-online.de/em/datasheet/629105150921.pdf; Published Date: September 2018; Publisher: Wurth Elektronik; Orientation: Horizontal; Connector Type: Micro USB 2.0 Type AB; Operating Temperature: -40 to 85 degC; Mounting Technology: SMT; Gender: Receptacle; Packaging: Tape and Reel; ComponentLink3Description: Global Supply; ComponentLink3URL: https://www.we-online.com/en/components/products/COM_MICRO_2_0_TYPE_AB_HORIZONTAL?sq=629105150921#629105150921; ComponentLink4Description: Global Supply; ComponentLink4URL: https://www.mouser.vn/ProductDetail/Wurth-Elektronik/629105150921?qs=a9WhcLg8qCztfCBvRE9gEg%3D%3D; Supply URL 1: https://www.mouser.vn/ProductDetail/Wurth-Elektronik/629105150921?qs=a9WhcLg8qCztfCBvRE9gEg%3D%3D
footprint 629105150921
pins: 1 VBUS, 2 D-, 3 D+, 4 ID, 5 GND, Shell Shield

## 632121300001
designator J?
USB 3.1 Type A Receptacle WR-COM, Horizontal, THT; Part Number: 632121300001; Rated Current: 5 A; Contact Resistance: 50 mOhm; Working Voltage: 20 VDC; Supply Name 1: Mouser; Supply SN 1: 710-632121300001; Supply Name 2: thegioiic; ComponentLink1Description: Manufacturer; ComponentLink1URL: http://www.we-online.de; ComponentLink2Description: Datasheet; ComponentLink2URL: https://katalog.we-online.de/em/datasheet/632121300001.pdf; Published Date: September 2018; Publisher: Wurth Elektronik; Orientation: Horizontal; Connector Type: USB 3.1 Type A; Operating Temperature: -20 to 85 degC; Mounting Technology: THT; Gender: Receptacle; Packaging: Tray; ComponentLink3Description: Global Supply; ComponentLink3URL: https://www.we-online.com/en/components/products/COM_3_1_THT_TYPE_A_RECEPTACLE_HORIZONTAL?sq=632121300001#632121300001; ComponentLink4Description: Global Supply; ComponentLink4URL: https://www.mouser.vn/ProductDetail/Wurth-Elektronik/632121300001?qs=NK6InXoXhq7TSgNc1jHUCw%3D%3D; ComponentLink5Description: Local Supply; ComponentLink5URL: https://www.thegioiic.com/af10-dip-cong-usb-cai-ngan-2-0-type-a-dau-cai-ngan-4-chan-cong-90-do; Supply URL 1: https://www.mouser.vn/ProductDetail/Wurth-Elektronik/632121300001?qs=NK6InXoXhq7TSgNc1jHUCw%3D%3D; Supply URL 2: https://www.thegioiic.com/af10-dip-cong-usb-cai-ngan-2-0-type-a-dau-cai-ngan-4-chan-cong-90-do
footprint 632121300001
pins: 1 VBUS, 2 D-, 3 D+, 4 GND, 5 StdA_SSRX-, 6 StdA_SSRX+, 7 GND_DRAIN, 8 StdA_SSTX-, 9 StdA_SSTX+, 10 PD DETECT, 11 INSERTION DETECT, Shell Shield

## 632712000011
designator J?
USB 3.1 Type C Plug WR-COM, Horizontal, SMT; Part Number: 632712000011; Rated Current: 5 A; Contact Resistance: 30 mOhm; Working Voltage: 20 VDC; Supply Name 1: Mouser; Supply SN 1: 710-632712000011; ComponentLink1Description: Manufacturer; ComponentLink1URL: http://www.we-online.de; ComponentLink2Description: Datasheet; ComponentLink2URL: https://katalog.we-online.de/em/datasheet/632712000011.pdf; Published Date: September 2018; Publisher: Wurth Elektronik; Orientation: Horizontal; Connector Type: USB 3.1 Type C; Operating Temperature: -25 to 105 degC; Mounting Technology: SMT; Gender: Plug; Packaging: Tape and Reel; ComponentLink3Description: Global Supply; ComponentLink3URL: https://www.we-online.com/en/components/products/COM_3_1_SMT_TYPE_C_PLUG_HORIZONTAL?sq=632712000011#632712000011; ComponentLink4Description: Global Supply; ComponentLink4URL: https://www.mouser.vn/c/?q=632712000011; Supply URL 1: https://www.mouser.vn/ProductDetail/Wurth-Elektronik/632712000011?qs=NK6InXoXhq7nh90vupp8Aw%3D%3D
footprint 632712000011
pins: A1 GND, A2 SSTXp1, A3 SSTXn1, A4 VBUS, A5 CC1, A6 Dp1, A7 Dn1, A8 SBU1, A9 VBUS, A10 SSRXn2, A11 SSRXp2, A12 GND, B1 GND, B2 SSTXp2, B3 SSTXn2, B4 VBUS, B5 CC2, B8 SBU2, B9 VBUS, B10 SSRXn1, B11 SSRXp1, B12 GND, Shell Shield

## 632712000112
designator J?
USB 3.1 Type C Plug WR-COM, Horizontal, SMT; Part Number: 632712000112; Rated Current: 5 A; Working Voltage: 20 VDC; Contact Resistance: 40 mOhm; Supply Name 1: Mouser; Supply SN 1: 710-632712000112; ComponentLink1Description: Manufacturer; ComponentLink1URL: http://www.we-online.de; ComponentLink2Description: Datasheet; ComponentLink2URL: https://katalog.we-online.de/em/datasheet/632712000112.pdf; Published Date: November 2018; Publisher: Wurth Elektronik; Orientation: Horizontal; Connector Type: USB 3.1 Type C; Operating Temperature: -40 to 85 degC; Mounting Technology: SMT; Gender: Plug; Packaging: Tray; ComponentLink3Description: Global Supply; ComponentLink3URL: https://www.we-online.com/en/components/products/COM_3_1_SMT_TYPE_C_PLUG_HORIZONTAL_0_8MM?sq=632712000112#632712000112; ComponentLink4Description: Global Supply; ComponentLink4URL: https://www.mouser.vn/ProductDetail/Wurth-Elektronik/632712000112?qs=2WXlatMagcFm%2Fxqsv0gybg%3D%3D; Supply URL 1: https://www.mouser.vn/ProductDetail/Wurth-Elektronik/632712000112?qs=2WXlatMagcFm%2Fxqsv0gybg%3D%3D
footprint 632712000112
pins: A1 GND, A2 SSTXp1, A3 SSTXn1, A4 VBUS, A5 CC1, A6 Dp1, A7 Dn1, A8 SBU1, A9 VBUS, A10 SSRXn2, A11 SSRXp2, A12 GND, B1 GND, B2 SSTXp2, B3 SSTXn2, B4 VBUS, B5 CC2, B6 Dp2, B7 Dn2, B8 SBU2, B9 VBUS, B10 SSRXn1, B11 SSRXp1, B12 GND, Shell Shield

## 632722110112
designator J?
USB 3.1 Type C Receptacle WR-COM, Vertical, SMT; Part Number: 632722110112; Rated Current: 5 A; Working Voltage: 20 VDC; Contact Resistance: 40 mOhm; Supply Name 1: Mouser; Supply SN 1: 710-632722110112; ComponentLink1Description: Manufacturer; ComponentLink1URL: http://www.we-online.de; ComponentLink2Description: Datasheet; ComponentLink2URL: https://katalog.we-online.de/em/datasheet/632722110112.pdf; Published Date: November 2018; Publisher: Wurth Elektronik; Orientation: Vertical; Connector Type: USB 3.1 Type C; Operating Temperature: -40 to 85 degC; Mounting Technology: SMT; Gender: Receptacle; Packaging: Tape and Reel; ComponentLink3Description: Global Supply; ComponentLink3URL: https://www.we-online.com/en/components/products/COM_3_1_SMT_TYPE_C_RECEPTACLE_HORIZONTAL_1_0MM?sq=632722110112#632722110112; ComponentLink4Description: Global Supply; ComponentLink4URL: https://www.mouser.vn/ProductDetail/Wurth-Elektronik/632722110112?qs=2WXlatMagcH6zbfYjgLonA%3D%3D; Supply URL 1: https://www.mouser.vn/ProductDetail/Wurth-Elektronik/632722110112?qs=2WXlatMagcH6zbfYjgLonA%3D%3D
footprint 632722110112
pins: A1 GND, A2 SSTXp1, A3 SSTXn1, A4 VBUS, A5 CC1, A6 Dp1, A7 Dn1, A8 SBU1, A9 VBUS, A10 SSRXn2, A11 SSRXp2, A12 GND, B1 GND, B2 SSTXp2, B3 SSTXn2, B4 VBUS, B5 CC2, B6 Dp2, B7 Dn2, B8 SBU2, B9 VBUS, B10 SSRXn1, B11 SSRXp1, B12 GND, Shell Shield

## 632723100011
designator J?
USB 3.1 Type C Receptacle WR-COM, Horizontal, SMT / THT; Part Number: 632723100011; Rated Current: 5 A; Contact Resistance: 30 mOhm; Working Voltage: 20 VDC; Supply Name 1: Mouser; Supply SN 1: 710-632723100011; Supply Name 2: thegioiic; ComponentLink1Description: Manufacturer; ComponentLink1URL: http://www.we-online.de; ComponentLink2Description: Datasheet; ComponentLink2URL: https://katalog.we-online.de/em/datasheet/632723x00011%282%29.pdf; Published Date: September 2018; Publisher: Wurth Elektronik; Orientation: Horizontal; Connector Type: USB 3.1 Type C; Operating Temperature: -40 to 105 degC; Mounting Technology: SMT / THT; Gender: Receptacle; Packaging: Tape and Reel; ComponentLink3Description: Global Supply; ComponentLink3URL: https://www.we-online.com/en/components/products/COM_3_1_THR_SMT_TYPE_C_RECEPTACLE_HORIZONTAL?sq=632723100011#632723100011; ComponentLink4Description: Global Supply; ComponentLink4URL: https://www.mouser.vn/c/?q=632723100011; ComponentLink5Description: Local Supply; ComponentLink5URL: https://www.thegioiic.com/cong-usb-cai-3-1-type-c-24-chan-cong-90-do; Supply URL 1: https://www.mouser.vn/ProductDetail/Wurth-Elektronik/632723100011?qs=NK6InXoXhq4o62C9ULXLjQ%3D%3D; Supply URL 2: https://www.thegioiic.com/cong-usb-cai-3-1-type-c-24-chan-cong-90-do
footprint 632723100011
pins: A1 GND, A2 SSTXp1, A3 SSTXn1, A4 VBUS, A5 CC1, A6 Dp1, A7 Dn1, A8 SBU1, A9 VBUS, A10 SSRXn2, A11 SSRXp2, A12 GND, B1 GND, B2 SSTXp2, B3 SSTXn2, B4 VBUS, B5 CC2, B6 Dp2, B7 Dn2, B8 SBU2, B9 VBUS, B10 SSRXn1, B11 SSRXp1, B12 GND, G1 GND, G2 GND, Shell Shield

## 632723130112
designator J?
USB 3.1 Type C Receptacle WR-COM, Horizontal, THR / SMT; Part Number: 632723130112; Rated Current: 5 A; Working Voltage: 20 VDC; Contact Resistance: 40 mOhm; Supply Name 1: Mouser; Supply SN 1: 710-632723130112; Supply Name 2: thegioiic; ComponentLink1Description: Manufacturer; ComponentLink1URL: http://www.we-online.de; ComponentLink2Description: Datasheet; ComponentLink2URL: https://katalog.we-online.de/em/datasheet/632723130112.pdf; Published Date: November 2018; Publisher: Wurth Elektronik; Orientation: Horizontal; Connector Type: USB 3.1 Type C; Operating Temperature: -40 to 85 degC; Mounting Technology: THR / SMT; Gender: Receptacle; Packaging: Tape and Reel; ComponentLink3Description: Global Supply; ComponentLink3URL: https://www.we-online.com/en/system/search?sword=632723130112; ComponentLink4Description: Global Supply; ComponentLink4URL: https://www.mouser.vn/ProductDetail/Wurth-Elektronik/632723130112?qs=2WXlatMagcEknienHxbwUw%3D%3D; ComponentLink5Description: Local Supply; ComponentLink5URL: https://www.thegioiic.com/cong-usb-cai-3-1-type-c-24-chan-thang-dan-smd; Supply URL 1: https://www.mouser.vn/ProductDetail/Wurth-Elektronik/632723130112?qs=2WXlatMagcEknienHxbwUw%3D%3D; Supply URL 2: https://www.thegioiic.com/cong-usb-cai-3-1-type-c-24-chan-thang-dan-smd
footprint 632723130112
pins: A1 GND, A2 SSTXp1, A3 SSTXn1, A4 VBUS, A5 CC1, A6 Dp1, A7 Dn1, A8 SBU1, A9 VBUS, A10 SSRXn2, A11 SSRXp2, A12 GND, B1 GND, B2 SSTXp2, B3 SSTXn2, B4 VBUS, B5 CC2, B6 Dp2, B7 Dn2, B8 SBU2, B9 VBUS, B10 SSRXn1, B11 SSRXp1, B12 GND, Shell Shield

## 632723300011
designator J?
USB 3.1 Type C Receptacle WR-COM, Horizontal, SMT / THT; Part Number: 632723300011; Rated Current: 5 A; Contact Resistance: 30 mOhm; Working Voltage: 20 VDC; Supply Name 1: Mouser; Supply SN 1: 710-632723300011; Supply Name 2: thegioiic; ComponentLink1Description: Manufacturer; ComponentLink1URL: http://www.we-online.de; ComponentLink2Description: Datasheet; ComponentLink2URL: https://katalog.we-online.de/em/datasheet/632723x00011%282%29.pdf; Published Date: September 2018; Publisher: Wurth Elektronik; Orientation: Horizontal; Connector Type: USB 3.1 Type C; Operating Temperature: -40 to 105 degC; Mounting Technology: SMT / THT; Gender: Receptacle; Packaging: Tape and Reel; ComponentLink4Description: Global Supply; ComponentLink4URL: https://www.we-online.com/en/components/products/COM_3_1_THR_SMT_TYPE_C_RECEPTACLE_HORIZONTAL?sq=632723300011#632723300011; ComponentLink5Description: Local Supply; ComponentLink5URL: https://www.mouser.vn/c/?q=632723300011; ComponentLink6Description: Local Supply; ComponentLink6URL: https://www.thegioiic.com/cong-usb-cai-3-1-type-c-24-chan-cong-90-do; Supply URL 1: https://www.mouser.vn/ProductDetail/Wurth-Elektronik/632723300011?qs=NK6InXoXhq4%252B5eM1PePLPg%3D%3D; Supply URL 2: https://www.thegioiic.com/cong-usb-cai-3-1-type-c-24-chan-cong-90-do
footprint 632723300011
pins: A1 GND, A2 SSTXp1, A3 SSTXn1, A4 VBUS, A5 CC1, A6 Dp1, A7 Dn1, A8 SBU1, A9 VBUS, A10 SSRXn2, A11 SSRXp2, A12 GND, B1 GND, B2 SSTXp2, B3 SSTXn2, B4 VBUS, B5 CC2, B6 Dp2, B7 Dn2, B8 SBU2, B9 VBUS, B10 SSRXn1, B11 SSRXp1, B12 GND, G1 GND, G2 GND, Shell Shield

## 651005136421
designator J?
Mini USB 2.0 Type B Receptacle WR-COM, Vertical, THT; Part Number: 651005136421; Rated Current: 1 A; Contact Resistance: 20 mOhm; Working Voltage: 30 VAC; Supply Name 1: Mouser; Supply SN 1: 710-651005136421; ComponentLink1Description: Manufacturer; ComponentLink1URL: http://www.we-online.de; ComponentLink2Description: Datasheet; ComponentLink2URL: https://katalog.we-online.de/em/datasheet/651005136421%282%29.pdf; Published Date: September 2018; Publisher: Wurth Elektronik; Orientation: Vertical; Connector Type: Mini USB 2.0 Type B; Operating Temperature: -40 to 105 degC; Mounting Technology: THT; Gender: Receptacle; Packaging: Tray; ComponentLink3Description: Global Supply; ComponentLink3URL: https://www.we-online.com/en/components/products/COM_MINI_TYPE_B_VERTICAL?sq=651005136421#651005136421; ComponentLink4Description: Global Supply; ComponentLink4URL: https://www.mouser.vn/ProductDetail/Wurth-Elektronik/651005136421?qs=rS3zZhy2AQP6%2FhZrZUmISw%3D%3D; Supply URL 1: https://www.mouser.vn/ProductDetail/Wurth-Elektronik/651005136421?qs=rS3zZhy2AQP6%2FhZrZUmISw%3D%3D
footprint 651005136421
pins: 1 VBUS, 2 D-, 3 D+, 4 ID, 5 GND, Shell Shield

## 651305142821
designator J?
Mini USB 2.0 Type AB Receptacle WR-COM, Horizontal, SMT, with Pads; Part Number: 651305142821; Rated Current: 1 A; Contact Resistance: 20 mOhm; Working Voltage: 30 VAC; Supply Name 1: Mouser; Supply SN 1: 710-651305142821; ComponentLink1Description: Manufacturer; ComponentLink1URL: http://www.we-online.de; ComponentLink2Description: Datasheet; ComponentLink2URL: https://katalog.we-online.de/em/datasheet/651305142821.pdf; Published Date: September 2018; Publisher: Wurth Elektronik; Orientation: Horizontal; Connector Type: Mini USB 2.0 Type AB; Operating Temperature: -40 to 105 degC; Mounting Technology: SMT; Gender: Receptacle; Packaging: Tape and Reel; ComponentLink3Description: Global Supply; ComponentLink3URL: https://www.we-online.com/en/components/products/COM_SMT_MINI_TYPE_AB_HORIZONTAL?sq=651305142821#651305142821; ComponentLink4Description: Global Supply; ComponentLink4URL: https://www.mouser.vn/ProductDetail/Wurth-Elektronik/651305142821?qs=7gQLVZk5cPlF7bfbuz8kNg%3D%3D; Supply URL 1: https://www.mouser.vn/ProductDetail/Wurth-Elektronik/651305142821?qs=7gQLVZk5cPlF7bfbuz8kNg%3D%3D
footprint 651305142821
pins: 1 VBUS, 2 D-, 3 D+, 4 ID, 5 GND, Shell Shield

## 692112030100
designator J?
USB 3.0 Type A Plug WR-COM, Horizontal, SMT, with Pegs and Clips; Part Number: 692112030100; Rated Current: 0.25 A; Contact Resistance: 50 mOhm; Working Voltage: 30 VAC; Supply Name 1: Mouser; Supply SN 1: 710-692112030100; Supply Name 2: thegioiic; ComponentLink1Description: Manufacturer; ComponentLink1URL: http://www.we-online.de; ComponentLink2Description: Datasheet; ComponentLink2URL: https://katalog.we-online.de/em/datasheet/692112030100.pdf; Published Date: September 2018; Publisher: Wurth Elektronik; Orientation: Horizontal; Connector Type: USB 3.0 Type A; Operating Temperature: -20 to 85 degC; Mounting Technology: SMT; Gender: Plug; Packaging: Tray; ComponentLink3Description: Global Supply; ComponentLink3URL: https://www.we-online.com/en/components/products/COM_3_0_SMT_TYPE_A_PLUG_WITH_CLIP?sq=692112030100#692112030100; ComponentLink4Description: Global Supply; ComponentLink4URL: https://www.mouser.vn/ProductDetail/Wurth-Elektronik/692112030100?qs=e5m3IbTHPW8iHQO2HaiyOA%3D%3D; ComponentLink5Description: Local Supply; ComponentLink5URL: https://www.thegioiic.com/cong-usb-duc-3-0-type-a-9-chan-thang-xuyen-lo; Supply URL 1: https://www.mouser.vn/ProductDetail/Wurth-Elektronik/692112030100?qs=e5m3IbTHPW8iHQO2HaiyOA%3D%3D; Supply URL 2: https://www.thegioiic.com/cong-usb-duc-3-0-type-a-9-chan-thang-xuyen-lo
footprint 692112030100
pins: 1 VBUS, 2 D-, 3 D+, 4 GND, 5 StdA_SSRX-, 6 StdA_SSRX+, 7 GND_DRAIN, 8 StdA_SSTX-, 9 StdA_SSTX+, Shell Shield

## 692121030100
designator J?
USB 3.0 Type A Receptacle WR-COM, Horizontal, THT; Part Number: 692121030100; Rated Current: 0.25 A; Contact Resistance: 50 mOhm; Working Voltage: 30 VAC; Supply Name 1: Mouser; Supply SN 1: 710-692121030100; Supply Name 2: thegioiic; ComponentLink1Description: Manufacturer; ComponentLink1URL: http://www.we-online.de; ComponentLink2Description: Datasheet; ComponentLink2URL: https://katalog.we-online.de/em/datasheet/692121030100.pdf; Published Date: September 2018; Publisher: Wurth Elektronik; Orientation: Horizontal; Connector Type: USB 3.0 Type A; Operating Temperature: -20 to 85 degC; Mounting Technology: THT; Gender: Receptacle; Packaging: Tape and Reel; ComponentLink3Description: Global Supply; ComponentLink3URL: https://www.we-online.com/en/components/products/COM_3_0_TYPE_A_HORIZONTAL?sq=692121030100#692121030100; ComponentLink4Description: Global Supply; ComponentLink4URL: https://www.mouser.vn/ProductDetail/Wurth-Elektronik/692121030100?qs=e5m3IbTHPW%252BzU%252B9ZpCsp%2Fg%3D%3D; ComponentLink5Description: Local Supply; ComponentLink5URL: https://www.thegioiic.com/cong-usb-cai-3-0-type-a-9-chan-cong-90-do; Supply URL 1: https://www.mouser.vn/ProductDetail/Wurth-Elektronik/692121030100?qs=e5m3IbTHPW%252BzU%252B9ZpCsp%2Fg%3D%3D; Supply URL 2: https://www.thegioiic.com/cong-usb-cai-3-0-type-a-9-chan-cong-90-do
footprint 692121030100
pins: 1 VBUS, 2 D-, 3 D+, 4 GND, 5 StdA_SSRX-, 6 StdA_SSRX+, 7 GND_DRAIN, 8 StdA_SSTX-, 9 StdA_SSTX+, Shell Shield

## 692121130100
designator J?
USB 3.0 Type A Receptacle WR-COM, Reverse Horizontal, SMT / THT, with Clips, with 0.14 mm Offset; Part Number: 692121130100; Rated Current: 0.25 A; Contact Resistance: 50 mOhm; Working Voltage: 30 VAC; Supply Name 1: Mouser; Supply SN 1: 710-692121130100; ComponentLink1Description: Manufacturer; ComponentLink1URL: http://www.we-online.de; ComponentLink2Description: Datasheet; ComponentLink2URL: https://katalog.we-online.de/em/datasheet/692121130100.pdf; Published Date: September 2018; Publisher: Wurth Elektronik; Orientation: Reverse Horizontal; Connector Type: USB 3.0 Type A; Operating Temperature: -20 to 85 degC; Mounting Technology: SMT / THT; Gender: Receptacle; Packaging: Tape and Reel; ComponentLink3Description: Global Supply; ComponentLink3URL: https://www.we-online.com/en/components/products/COM_3_0_TYPE_A_HORIZONTAL?sq=692121030100#692121030100; ComponentLink4Description: Global Supply; ComponentLink4URL: https://www.mouser.vn/ProductDetail/Wurth-Elektronik/692121130100?qs=e5m3IbTHPW83%252BpYn754Ctg%3D%3D; Supply URL 1: https://www.mouser.vn/ProductDetail/Wurth-Elektronik/692121130100?qs=e5m3IbTHPW83%252BpYn754Ctg%3D%3D
footprint 692121130100
pins: 1 VBUS, 2 D-, 3 D+, 4 GND, 5 StdA_SSRX-, 6 StdA_SSRX+, 7 GND_DRAIN, 8 StdA_SSTX-, 9 StdA_SSTX+, Shell Shield